# Altium integrated library ECQUAAF104M.IntLib: 1 symbol
Pins are listed as number, name and electrical type; pins without a type are passive.

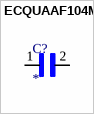
[diagram p0: symbol ECQUAAF104M]

## ECQUAAF104M
designator C?
MP: ECQUAAF104M; Availability: Unavailable; Price: None; Package: None; Value: *
footprint CAPRR1500W60L1750T500H1200
pins: 1, 2